# Altium schematic symbol library TLV76150DCYR.SchLib: 1 symbol
Pins are listed as number, name and electrical type; pins without a type are passive.

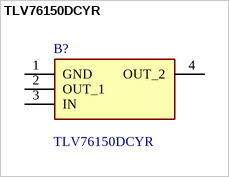
[diagram p0: symbol TLV76150DCYR]

## TLV76150DCYR
designator B?
Linear Voltage Regulators 1-A 16-V high-PSRR linear voltage regulator; Manufacturer_Name: Texas Instruments; Geometry.Height: 1.8mm; Mouser Part Number: 595-TLV76150DCYR; Mouser Price/Stock: https://www.mouser.co.uk/ProductDetail/Texas-Instruments/TLV76150DCYR?qs=Jm2GQyTW%2Fbii1Rd2R0M2bQ%3D%3D; Manufacturer_Part_Number: TLV76150DCYR; Datasheet Link: https://www.ti.com/lit/ds/symlink/tlv761.pdf
footprint SOT230P700X180-4N
pins: 1 GND, 2 OUT_1, 3 IN, 4 OUT_2